# Altium schematic symbol library AM26LS32ACDR.SchLib: 1 symbol
Pins are listed as number, name and electrical type; pins without a type are passive.

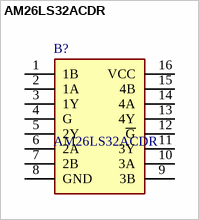
[diagram p0: symbol AM26LS32ACDR]

## AM26LS32ACDR
designator B?
Quadruple Differential Line Receivers; Manufacturer_Name: Texas Instruments; Geometry.Height: 1.75mm; TME Electronic Components Part Number: *; TME Electronic Components Price/Stock: *; Manufacturer_Part_Number: AM26LS32ACDR; Datasheet Link: http://www.ti.com/lit/gpn/am26ls32ac
footprint SOIC127P600X175-16N
pins: 1 1B, 2 1A, 3 1Y, 4 G, 5 2Y, 6 2A, 7 2B, 8 GND, 9 3B, 10 3A, 11 3Y, 12 ~{G}, 13 4Y, 14 4A, 15 4B, 16 VCC